# Altium footprint library WR-PHD_Socket Header_2.54mm.PcbLib: 187 footprints (part 2 of 12)
Each footprint in its own frame and in the unit in brackets; x right, y up, seen from the top. Pads: shape width x height; smd on the part's side, far side on the other; paste and mask are expansions set on the pad; w line width, h text height; cw(c..) or ccw(c..) is an arc to the next point about the centre after c.
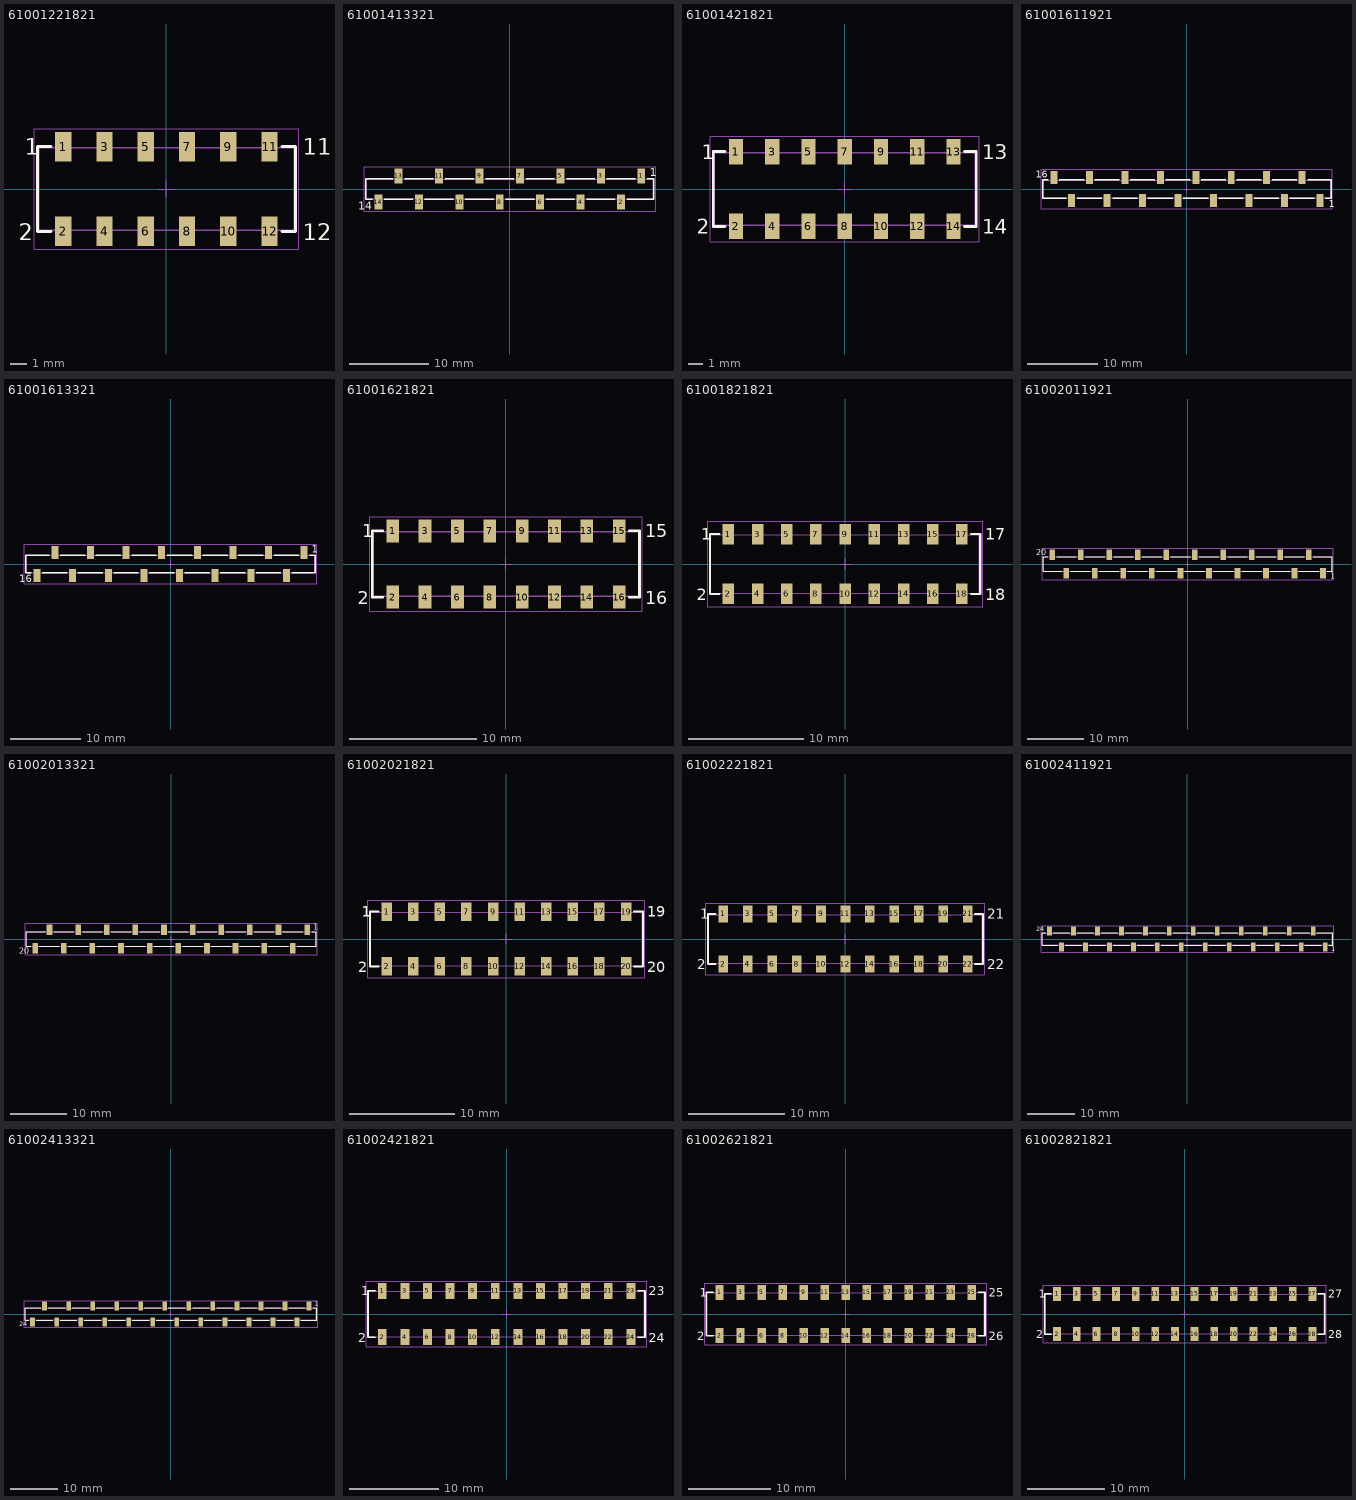
[diagram p1: the footprints below, top view; thin cyan lines are the x and y axes]

## 61001221821 [mm] "Socket Header, Pitch 2.54 mm, SMT, Vertical, dual row, 12p"
height 7.45
pads (12):
  rect 1x1.8 smd: 1(-6.35,2.6) 2(-6.35,-2.6) 3(-3.81,2.6) 4(-3.81,-2.6) 5(-1.27,2.6) 6(-1.27,-2.6) 7(1.27,2.6) 8(1.27,-2.6) 9(3.81,2.6) 10(3.81,-2.6) 11(6.35,2.6) 12(6.35,-2.6)
Top Overlay:
  lines w0.2: -7.13,-2.615 -7.945,-2.615 -7.945,2.615 -7.13,2.615 ; 7.13,-2.615 7.945,-2.615 7.945,2.615 7.13,2.615
  text "1" at -8.73,2.1 h1.02
  text "2" at -9.08,-3.15 h1.02
  text "11" at 8.38,2.1 h1.02
  text "12" at 8.38,-3.15 h1.02
Mechanical 13:
  lines w0.1: -6.67,-2.54 -6.67,-3.35 -6.03,-3.35 -6.03,-2.54 ; -6.67,2.54 -6.67,3.35 -6.03,3.35 -6.03,2.54 ; -4.13,-2.54 -4.13,-3.35 -3.49,-3.35 -3.49,-2.54 ; -4.13,2.54 -4.13,3.35 -3.49,3.35 -3.49,2.54 ; -1.59,-2.54 -1.59,-3.35 -0.95,-3.35 -0.95,-2.54 ; -1.59,2.54 -1.59,3.35 -0.95,3.35 -0.95,2.54 ; 0.95,-2.54 0.95,-3.35 1.59,-3.35 1.59,-2.54 ; 0.95,2.54 0.95,3.35 1.59,3.35 1.59,2.54 ; 3.49,-2.54 3.49,-3.35 4.13,-3.35 4.13,-2.54 ; 3.49,2.54 3.49,3.35 4.13,3.35 4.13,2.54 ; 6.03,-2.54 6.03,-3.35 6.67,-3.35 6.67,-2.54 ; 6.03,2.54 6.03,3.35 6.67,3.35 6.67,2.54 ; -7.87,-2.54 7.87,-2.54 7.87,2.54 -7.87,2.54 -7.87,-2.54
Mechanical 15:
  lines w0.05: -0.5,0 0.5,0 ; 0,-0.5 0,0.5 ; -8.145,-3.7 8.145,-3.7 8.145,3.7 -8.145,3.7 -8.145,-3.7
3D body "61001221821.stp": height 8.5, standoff 0, extent -7.62,-3.35 7.62,3.35

## 61001413321 [mm] "Socket Header, Pitch 2.54 mm, SMT, Vertical, single row, 14p"
height 7.5
pads (14):
  rect 1x1.91 smd: 1(16.51,1.645) 2(13.97,-1.645) 3(11.43,1.645) 4(8.89,-1.645) 5(6.35,1.645) 6(3.81,-1.645) 7(1.27,1.645) 8(-1.27,-1.645) 9(-3.81,1.645) 10(-6.35,-1.645) 11(-8.89,1.645) 12(-11.43,-1.645) 13(-13.97,1.645) 14(-16.51,-1.645)
Top Overlay:
  lines w0.2: -17.3,-1.275 -18.105,-1.275 -18.105,1.275 -14.75,1.275 ; -15.75,-1.275 -12.21,-1.275 ; -13.19,1.275 -9.65,1.275 ; -10.67,-1.275 -7.13,-1.275 ; -8.11,1.275 -4.57,1.275 ; -5.59,-1.275 -2.05,-1.275 ; -3.03,1.275 0.51,1.275 ; -0.51,-1.275 3.03,-1.275 ; 2.05,1.275 5.59,1.275 ; 4.57,-1.275 8.11,-1.275 ; 7.13,1.275 10.67,1.275 ; 9.65,-1.275 13.19,-1.275 ; 12.21,1.275 15.75,1.275 ; 14.75,-1.275 18.105,-1.275 18.105,1.275 17.3,1.275
  text "14" at -19.08,-2.6 h1.02
  text "1" at 17.6,1.6 h1.02
Mechanical 13:
  lines w0.1: -16.76,-1.25 -16.76,-2.025 -16.26,-2.025 -16.26,-1.25 ; -14.22,1.25 -14.22,2.025 -13.72,2.025 -13.72,1.25 ; -11.68,-1.25 -11.68,-2.025 -11.18,-2.025 -11.18,-1.25 ; -9.14,1.25 -9.14,2.025 -8.64,2.025 -8.64,1.25 ; -6.6,-1.25 -6.6,-2.025 -6.1,-2.025 -6.1,-1.25 ; -4.06,1.25 -4.06,2.025 -3.56,2.025 -3.56,1.25 ; -1.52,-1.25 -1.52,-2.025 -1.02,-2.025 -1.02,-1.25 ; 1.02,1.25 1.02,2.025 1.52,2.025 1.52,1.25 ; 3.56,-1.25 3.56,-2.025 4.06,-2.025 4.06,-1.25 ; 6.1,1.25 6.1,2.025 6.6,2.025 6.6,1.25 ; 8.64,-1.25 8.64,-2.025 9.14,-2.025 9.14,-1.25 ; 11.18,1.25 11.18,2.025 11.68,2.025 11.68,1.25 ; 13.72,-1.25 13.72,-2.025 14.22,-2.025 14.22,-1.25 ; 16.26,1.25 16.26,2.025 16.76,2.025 16.76,1.25 ; -18.03,-1.25 18.03,-1.25 18.03,1.25 -18.03,1.25 -18.03,-1.25
Mechanical 15:
  lines w0.05: -0.5,0 0.5,0 ; 0,-0.5 0,0.5 ; -18.305,-2.8 -18.305,2.8 18.305,2.8 18.305,-2.8 -18.305,-2.8
3D body "61001413321.stp": height 7.5, standoff 0, extent -18.03,-2.025 18.03,2.025

## 61001421821 [mm] "Socket Header, Pitch 2.54 mm, SMT, Vertical, dual row, 14p"
height 7.45
pads (14):
  rect 1x1.8 smd: 1(-7.62,2.6) 2(-7.62,-2.6) 3(-5.08,2.6) 4(-5.08,-2.6) 5(-2.54,2.6) 6(-2.54,-2.6) 7(0,2.6) 8(0,-2.6) 9(2.54,2.6) 10(2.54,-2.6) 11(5.08,2.6) 12(5.08,-2.6) 13(7.62,2.6) 14(7.62,-2.6)
Top Overlay:
  lines w0.2: -8.4,-2.615 -9.215,-2.615 -9.215,2.615 -8.4,2.615 ; 8.4,-2.615 9.215,-2.615 9.215,2.615 8.4,2.615
  text "1" at -10,2.1 h1.02
  text "2" at -10.35,-3.15 h1.02
  text "13" at 9.65,2.1 h1.02
  text "14" at 9.65,-3.15 h1.02
Mechanical 13:
  lines w0.1: -7.94,-2.54 -7.94,-3.35 -7.3,-3.35 -7.3,-2.54 ; -7.94,2.54 -7.94,3.35 -7.3,3.35 -7.3,2.54 ; -5.4,-2.54 -5.4,-3.35 -4.76,-3.35 -4.76,-2.54 ; -5.4,2.54 -5.4,3.35 -4.76,3.35 -4.76,2.54 ; -2.86,-2.54 -2.86,-3.35 -2.22,-3.35 -2.22,-2.54 ; -2.86,2.54 -2.86,3.35 -2.22,3.35 -2.22,2.54 ; -0.32,-2.54 -0.32,-3.35 0.32,-3.35 0.32,-2.54 ; -0.32,2.54 -0.32,3.35 0.32,3.35 0.32,2.54 ; 2.22,-2.54 2.22,-3.35 2.86,-3.35 2.86,-2.54 ; 2.22,2.54 2.22,3.35 2.86,3.35 2.86,2.54 ; 4.76,-2.54 4.76,-3.35 5.4,-3.35 5.4,-2.54 ; 4.76,2.54 4.76,3.35 5.4,3.35 5.4,2.54 ; 7.3,-2.54 7.3,-3.35 7.94,-3.35 7.94,-2.54 ; 7.3,2.54 7.3,3.35 7.94,3.35 7.94,2.54 ; -9.14,-2.54 -9.14,2.54 9.14,2.54 9.14,-2.54 -9.14,-2.54
Mechanical 15:
  lines w0.05: -0.5,0 0.5,0 ; 0,-0.5 0,0.5 ; -9.415,-3.7 -9.415,3.7 9.415,3.7 9.415,-3.7 -9.415,-3.7
3D body "61001421821.stp": height 8.5, standoff 0, extent -8.89,-3.35 8.89,3.35

## 61001611921 [mm] "Socket Header, Pitch 2.54 mm, SMT, Vertical, single row, 16p"
height 7.5
pads (16):
  rect 1x1.91 smd: 1(19.05,-1.645) 2(16.51,1.645) 3(13.97,-1.645) 4(11.43,1.645) 5(8.89,-1.645) 6(6.35,1.645) 7(3.81,-1.645) 8(1.27,1.645) 9(-1.27,-1.645) 10(-3.81,1.645) 11(-6.35,-1.645) 12(-8.89,1.645) 13(-11.43,-1.645) 14(-13.97,1.645) 15(-16.51,-1.645) 16(-19.05,1.645)
Top Overlay:
  lines w0.2: -19.84,1.325 -20.645,1.325 -20.645,-1.325 -17.28,-1.325 ; -18.26,1.325 -14.74,1.325 ; -15.74,-1.325 -12.22,-1.325 ; -13.18,1.325 -9.66,1.325 ; -10.66,-1.325 -7.14,-1.325 ; -8.1,1.325 -4.58,1.325 ; -5.58,-1.325 -2.06,-1.325 ; -3.02,1.325 0.5,1.325 ; -0.5,-1.325 3.02,-1.325 ; 2.06,1.325 5.58,1.325 ; 4.58,-1.325 8.1,-1.325 ; 7.14,1.325 10.66,1.325 ; 9.66,-1.325 13.18,-1.325 ; 12.22,1.325 15.74,1.325 ; 14.74,-1.325 18.26,-1.325 ; 17.28,1.325 20.645,1.325 20.645,-1.325 19.84,-1.325
  text "1" at 20.34,-2.6 h1.02
  text "16" at -21.62,1.6 h1.02
Mechanical 13:
  lines w0.1: -19.3,1.25 -19.3,2.025 -18.8,2.025 -18.8,1.25 ; -16.76,-1.25 -16.76,-2.025 -16.26,-2.025 -16.26,-1.25 ; -14.22,1.25 -14.22,2.025 -13.72,2.025 -13.72,1.25 ; -11.68,-1.25 -11.68,-2.025 -11.18,-2.025 -11.18,-1.25 ; -9.14,1.25 -9.14,2.025 -8.64,2.025 -8.64,1.25 ; -6.6,-1.25 -6.6,-2.025 -6.1,-2.025 -6.1,-1.25 ; -4.06,1.25 -4.06,2.025 -3.56,2.025 -3.56,1.25 ; -1.52,-1.25 -1.52,-2.025 -1.02,-2.025 -1.02,-1.25 ; 1.02,1.25 1.02,2.025 1.52,2.025 1.52,1.25 ; 3.56,-1.25 3.56,-2.025 4.06,-2.025 4.06,-1.25 ; 6.1,1.25 6.1,2.025 6.6,2.025 6.6,1.25 ; 8.64,-1.25 8.64,-2.025 9.14,-2.025 9.14,-1.25 ; 11.18,1.25 11.18,2.025 11.68,2.025 11.68,1.25 ; 13.72,-1.25 13.72,-2.025 14.22,-2.025 14.22,-1.25 ; 16.26,1.25 16.26,2.025 16.76,2.025 16.76,1.25 ; 18.8,-1.25 18.8,-2.025 19.3,-2.025 19.3,-1.25 ; -20.57,-1.25 -20.57,1.25 20.57,1.25 20.57,-1.25 -20.57,-1.25
Mechanical 15:
  lines w0.05: -0.5,0 0.5,0 ; 0,-0.5 0,0.5 ; -20.845,-2.8 20.845,-2.8 20.845,2.8 -20.845,2.8 -20.845,-2.8
3D body "61001611921.stp": height 7.5, standoff 0, extent -20.57,-2.025 20.57,2.025

## 61001613321 [mm] "Socket Header, Pitch 2.54 mm, SMT, Vertical, single row, 16p"
height 7.5
pads (16):
  rect 1x1.91 smd: 1(19.05,1.645) 2(16.51,-1.645) 3(13.97,1.645) 4(11.43,-1.645) 5(8.89,1.645) 6(6.35,-1.645) 7(3.81,1.645) 8(1.27,-1.645) 9(-1.27,1.645) 10(-3.81,-1.645) 11(-6.35,1.645) 12(-8.89,-1.645) 13(-11.43,1.645) 14(-13.97,-1.645) 15(-16.51,1.645) 16(-19.05,-1.645)
Top Overlay:
  lines w0.2: -19.84,-1.275 -20.645,-1.275 -20.645,1.275 -17.29,1.275 ; -18.29,-1.275 -14.75,-1.275 ; -15.73,1.275 -12.19,1.275 ; -13.21,-1.275 -9.67,-1.275 ; -10.65,1.275 -7.11,1.275 ; -8.13,-1.275 -4.59,-1.275 ; -5.57,1.275 -2.03,1.275 ; -3.05,-1.275 0.49,-1.275 ; -0.49,1.275 3.05,1.275 ; 2.03,-1.275 5.57,-1.275 ; 4.59,1.275 8.13,1.275 ; 7.11,-1.275 10.65,-1.275 ; 9.67,1.275 13.21,1.275 ; 12.19,-1.275 15.73,-1.275 ; 14.75,1.275 18.29,1.275 ; 17.29,-1.275 20.645,-1.275 20.645,1.275 19.84,1.275
  text "1" at 20.14,1.6 h1.02
  text "16" at -21.62,-2.6 h1.02
Mechanical 13:
  lines w0.1: -19.3,-1.25 -19.3,-2.025 -18.8,-2.025 -18.8,-1.25 ; -16.76,1.25 -16.76,2.025 -16.26,2.025 -16.26,1.25 ; -14.22,-1.25 -14.22,-2.025 -13.72,-2.025 -13.72,-1.25 ; -11.68,1.25 -11.68,2.025 -11.18,2.025 -11.18,1.25 ; -9.14,-1.25 -9.14,-2.025 -8.64,-2.025 -8.64,-1.25 ; -6.6,1.25 -6.6,2.025 -6.1,2.025 -6.1,1.25 ; -4.06,-1.25 -4.06,-2.025 -3.56,-2.025 -3.56,-1.25 ; -1.52,1.25 -1.52,2.025 -1.02,2.025 -1.02,1.25 ; 1.02,-1.25 1.02,-2.025 1.52,-2.025 1.52,-1.25 ; 3.56,1.25 3.56,2.025 4.06,2.025 4.06,1.25 ; 6.1,-1.25 6.1,-2.025 6.6,-2.025 6.6,-1.25 ; 8.64,1.25 8.64,2.025 9.14,2.025 9.14,1.25 ; 11.18,-1.25 11.18,-2.025 11.68,-2.025 11.68,-1.25 ; 13.72,1.25 13.72,2.025 14.22,2.025 14.22,1.25 ; 16.26,-1.25 16.26,-2.025 16.76,-2.025 16.76,-1.25 ; 18.8,1.25 18.8,2.025 19.3,2.025 19.3,1.25 ; -20.57,-1.25 20.57,-1.25 20.57,1.25 -20.57,1.25 -20.57,-1.25
Mechanical 15:
  lines w0.05: -0.5,0 0.5,0 ; 0,-0.5 0,0.5 ; -20.845,-2.8 -20.845,2.8 20.845,2.8 20.845,-2.8 -20.845,-2.8
3D body "61001613321.stp": height 7.5, standoff 0, extent -20.57,-2.025 20.57,2.025

## 61001621821 [mm] "Socket Header, Pitch 2.54 mm, SMT, Vertical, dual row, 16p"
height 7.45
pads (16):
  rect 1x1.8 smd: 1(-8.89,2.6) 2(-8.89,-2.6) 3(-6.35,2.6) 4(-6.35,-2.6) 5(-3.81,2.6) 6(-3.81,-2.6) 7(-1.27,2.6) 8(-1.27,-2.6) 9(1.27,2.6) 10(1.27,-2.6) 11(3.81,2.6) 12(3.81,-2.6) 13(6.35,2.6) 14(6.35,-2.6) 15(8.89,2.6) 16(8.89,-2.6)
Top Overlay:
  lines w0.2: -9.67,-2.615 -10.485,-2.615 -10.485,2.615 -9.67,2.615 ; 9.67,-2.615 10.485,-2.615 10.485,2.615 9.67,2.615
  text "1" at -11.27,2.1 h1.02
  text "2" at -11.62,-3.15 h1.02
  text "15" at 10.92,2.1 h1.02
  text "16" at 10.92,-3.15 h1.02
Mechanical 13:
  lines w0.1: -9.21,-2.54 -9.21,-3.35 -8.57,-3.35 -8.57,-2.54 ; -9.21,2.54 -9.21,3.35 -8.57,3.35 -8.57,2.54 ; -6.67,-2.54 -6.67,-3.35 -6.03,-3.35 -6.03,-2.54 ; -6.67,2.54 -6.67,3.35 -6.03,3.35 -6.03,2.54 ; -4.13,-2.54 -4.13,-3.35 -3.49,-3.35 -3.49,-2.54 ; -4.13,2.54 -4.13,3.35 -3.49,3.35 -3.49,2.54 ; -1.59,-2.54 -1.59,-3.35 -0.95,-3.35 -0.95,-2.54 ; -1.59,2.54 -1.59,3.35 -0.95,3.35 -0.95,2.54 ; 0.95,-2.54 0.95,-3.35 1.59,-3.35 1.59,-2.54 ; 0.95,2.54 0.95,3.35 1.59,3.35 1.59,2.54 ; 3.49,-2.54 3.49,-3.35 4.13,-3.35 4.13,-2.54 ; 3.49,2.54 3.49,3.35 4.13,3.35 4.13,2.54 ; 6.03,-2.54 6.03,-3.35 6.67,-3.35 6.67,-2.54 ; 6.03,2.54 6.03,3.35 6.67,3.35 6.67,2.54 ; 8.57,-2.54 8.57,-3.35 9.21,-3.35 9.21,-2.54 ; 8.57,2.54 8.57,3.35 9.21,3.35 9.21,2.54 ; -10.41,-2.54 -10.41,2.54 10.41,2.54 10.41,-2.54 -10.41,-2.54
Mechanical 15:
  lines w0.05: -0.5,0 0.5,0 ; 0,-0.5 0,0.5 ; -10.685,-3.7 -10.685,3.7 10.685,3.7 10.685,-3.7 -10.685,-3.7
3D body "61001621821.stp": height 8.5, standoff 0, extent -10.16,-3.35 10.16,3.35

## 61001821821 [mm] "Socket Header, Pitch 2.54 mm, SMT, Vertical, dual row, 18p"
height 7.45
pads (18):
  rect 1x1.8 smd: 1(-10.16,2.6) 2(-10.16,-2.6) 3(-7.62,2.6) 4(-7.62,-2.6) 5(-5.08,2.6) 6(-5.08,-2.6) 7(-2.54,2.6) 8(-2.54,-2.6) 9(0,2.6) 10(0,-2.6) 11(2.54,2.6) 12(2.54,-2.6) 13(5.08,2.6) 14(5.08,-2.6) 15(7.62,2.6) 16(7.62,-2.6) 17(10.16,2.6) 18(10.16,-2.6)
Top Overlay:
  lines w0.2: -10.94,-2.615 -11.755,-2.615 -11.755,2.615 -10.94,2.615 ; 10.94,-2.615 11.755,-2.615 11.755,2.615 10.94,2.615
  text "1" at -12.54,2.1 h1.02
  text "2" at -12.89,-3.15 h1.02
  text "17" at 12.19,2.1 h1.02
  text "18" at 12.19,-3.15 h1.02
Mechanical 13:
  lines w0.1: -10.48,-2.54 -10.48,-3.35 -9.84,-3.35 -9.84,-2.54 ; -10.48,2.54 -10.48,3.35 -9.84,3.35 -9.84,2.54 ; -7.94,-2.54 -7.94,-3.35 -7.3,-3.35 -7.3,-2.54 ; -7.94,2.54 -7.94,3.35 -7.3,3.35 -7.3,2.54 ; -5.4,-2.54 -5.4,-3.35 -4.76,-3.35 -4.76,-2.54 ; -5.4,2.54 -5.4,3.35 -4.76,3.35 -4.76,2.54 ; -2.86,-2.54 -2.86,-3.35 -2.22,-3.35 -2.22,-2.54 ; -2.86,2.54 -2.86,3.35 -2.22,3.35 -2.22,2.54 ; -0.32,-2.54 -0.32,-3.35 0.32,-3.35 0.32,-2.54 ; -0.32,2.54 -0.32,3.35 0.32,3.35 0.32,2.54 ; 2.22,-2.54 2.22,-3.35 2.86,-3.35 2.86,-2.54 ; 2.22,2.54 2.22,3.35 2.86,3.35 2.86,2.54 ; 4.76,-2.54 4.76,-3.35 5.4,-3.35 5.4,-2.54 ; 4.76,2.54 4.76,3.35 5.4,3.35 5.4,2.54 ; 7.3,-2.54 7.3,-3.35 7.94,-3.35 7.94,-2.54 ; 7.3,2.54 7.3,3.35 7.94,3.35 7.94,2.54 ; 9.84,-2.54 9.84,-3.35 10.48,-3.35 10.48,-2.54 ; 9.84,2.54 9.84,3.35 10.48,3.35 10.48,2.54 ; -11.68,-2.54 11.68,-2.54 11.68,2.54 -11.68,2.54 -11.68,-2.54
Mechanical 15:
  lines w0.05: -0.5,0 0.5,0 ; 0,-0.5 0,0.5 ; -11.955,-3.7 11.955,-3.7 11.955,3.7 -11.955,3.7 -11.955,-3.7
3D body "61001821821.stp": height 8.5, standoff 0, extent -11.43,-3.35 11.43,3.35

## 61002011921 [mm] "Socket Header, Pitch 2.54 mm, SMT, Vertical, single row, 20p"
height 7.5
pads (20):
  rect 1x1.91 smd: 1(24.13,-1.645) 2(21.59,1.645) 3(19.05,-1.645) 4(16.51,1.645) 5(13.97,-1.645) 6(11.43,1.645) 7(8.89,-1.645) 8(6.35,1.645) 9(3.81,-1.645) 10(1.27,1.645) 11(-1.27,-1.645) 12(-3.81,1.645) 13(-6.35,-1.645) 14(-8.89,1.645) 15(-11.43,-1.645) 16(-13.97,1.645) 17(-16.51,-1.645) 18(-19.05,1.645) 19(-21.59,-1.645) 20(-24.13,1.645)
Top Overlay:
  lines w0.2: -24.92,1.325 -25.725,1.325 -25.725,-1.325 -22.36,-1.325 ; -23.34,1.325 -19.82,1.325 ; -20.82,-1.325 -17.3,-1.325 ; -18.26,1.325 -14.74,1.325 ; -15.74,-1.325 -12.22,-1.325 ; -13.18,1.325 -9.66,1.325 ; -10.66,-1.325 -7.14,-1.325 ; -8.1,1.325 -4.58,1.325 ; -5.58,-1.325 -2.06,-1.325 ; -3.02,1.325 0.5,1.325 ; -0.5,-1.325 3.02,-1.325 ; 2.06,1.325 5.58,1.325 ; 4.58,-1.325 8.1,-1.325 ; 7.14,1.325 10.66,1.325 ; 9.66,-1.325 13.18,-1.325 ; 12.22,1.325 15.74,1.325 ; 14.74,-1.325 18.26,-1.325 ; 17.3,1.325 20.82,1.325 ; 19.82,-1.325 23.34,-1.325 ; 22.36,1.325 25.725,1.325 25.725,-1.325 24.92,-1.325
  text "1" at 25.42,-2.6 h1.02
  text "20" at -27,1.6 h1.02
Mechanical 13:
  lines w0.1: -24.38,1.25 -24.38,2.025 -23.88,2.025 -23.88,1.25 ; -21.84,-1.25 -21.84,-2.025 -21.34,-2.025 -21.34,-1.25 ; -19.3,1.25 -19.3,2.025 -18.8,2.025 -18.8,1.25 ; -16.76,-1.25 -16.76,-2.025 -16.26,-2.025 -16.26,-1.25 ; -14.22,1.25 -14.22,2.025 -13.72,2.025 -13.72,1.25 ; -11.68,-1.25 -11.68,-2.025 -11.18,-2.025 -11.18,-1.25 ; -9.14,1.25 -9.14,2.025 -8.64,2.025 -8.64,1.25 ; -6.6,-1.25 -6.6,-2.025 -6.1,-2.025 -6.1,-1.25 ; -4.06,1.25 -4.06,2.025 -3.56,2.025 -3.56,1.25 ; -1.52,-1.25 -1.52,-2.025 -1.02,-2.025 -1.02,-1.25 ; 1.02,1.25 1.02,2.025 1.52,2.025 1.52,1.25 ; 3.56,-1.25 3.56,-2.025 4.06,-2.025 4.06,-1.25 ; 6.1,1.25 6.1,2.025 6.6,2.025 6.6,1.25 ; 8.64,-1.25 8.64,-2.025 9.14,-2.025 9.14,-1.25 ; 11.18,1.25 11.18,2.025 11.68,2.025 11.68,1.25 ; 13.72,-1.25 13.72,-2.025 14.22,-2.025 14.22,-1.25 ; 16.26,1.25 16.26,2.025 16.76,2.025 16.76,1.25 ; 18.8,-1.25 18.8,-2.025 19.3,-2.025 19.3,-1.25 ; 21.34,1.25 21.34,2.025 21.84,2.025 21.84,1.25 ; 23.88,-1.25 23.88,-2.025 24.38,-2.025 24.38,-1.25 ; -25.65,-1.25 -25.65,1.25 25.65,1.25 25.65,-1.25 -25.65,-1.25
Mechanical 15:
  lines w0.05: -0.5,0 0.5,0 ; 0,-0.5 0,0.5 ; -25.925,-2.8 25.925,-2.8 25.925,2.8 -25.925,2.8 -25.925,-2.8
3D body "61002011921.stp": height 7.5, standoff 0, extent -25.65,-2.025 25.65,2.025

## 61002013321 [mm] "Socket Header, Pitch 2.54 mm, SMT, Vertical, single row, 20p"
height 7.5
pads (20):
  rect 1x1.91 smd: 1(24.13,1.645) 2(21.59,-1.645) 3(19.05,1.645) 4(16.51,-1.645) 5(13.97,1.645) 6(11.43,-1.645) 7(8.89,1.645) 8(6.35,-1.645) 9(3.81,1.645) 10(1.27,-1.645) 11(-1.27,1.645) 12(-3.81,-1.645) 13(-6.35,1.645) 14(-8.89,-1.645) 15(-11.43,1.645) 16(-13.97,-1.645) 17(-16.51,1.645) 18(-19.05,-1.645) 19(-21.59,1.645) 20(-24.13,-1.645)
Top Overlay:
  lines w0.2: -24.92,-1.275 -25.725,-1.275 -25.725,1.275 -22.37,1.275 ; -23.37,-1.275 -19.83,-1.275 ; -20.81,1.275 -17.27,1.275 ; -18.29,-1.275 -14.75,-1.275 ; -15.73,1.275 -12.19,1.275 ; -13.21,-1.275 -9.67,-1.275 ; -10.65,1.275 -7.11,1.275 ; -8.13,-1.275 -4.59,-1.275 ; -5.57,1.275 -2.03,1.275 ; -3.05,-1.275 0.49,-1.275 ; -0.49,1.275 3.05,1.275 ; 2.03,-1.275 5.57,-1.275 ; 4.59,1.275 8.13,1.275 ; 7.11,-1.275 10.65,-1.275 ; 9.67,1.275 13.21,1.275 ; 12.19,-1.275 15.73,-1.275 ; 14.75,1.275 18.29,1.275 ; 17.27,-1.275 20.81,-1.275 ; 19.83,1.275 23.37,1.275 ; 22.37,-1.275 25.725,-1.275 25.725,1.275 24.92,1.275
  text "1" at 25.22,1.6 h1.02
  text "20" at -27,-2.6 h1.02
Mechanical 13:
  lines w0.1: -24.38,-1.25 -24.38,-2.025 -23.88,-2.025 -23.88,-1.25 ; -21.84,1.25 -21.84,2.025 -21.34,2.025 -21.34,1.25 ; -19.3,-1.25 -19.3,-2.025 -18.8,-2.025 -18.8,-1.25 ; -16.76,1.25 -16.76,2.025 -16.26,2.025 -16.26,1.25 ; -14.22,-1.25 -14.22,-2.025 -13.72,-2.025 -13.72,-1.25 ; -11.68,1.25 -11.68,2.025 -11.18,2.025 -11.18,1.25 ; -9.14,-1.25 -9.14,-2.025 -8.64,-2.025 -8.64,-1.25 ; -6.6,1.25 -6.6,2.025 -6.1,2.025 -6.1,1.25 ; -4.06,-1.25 -4.06,-2.025 -3.56,-2.025 -3.56,-1.25 ; -1.52,1.25 -1.52,2.025 -1.02,2.025 -1.02,1.25 ; 1.02,-1.25 1.02,-2.025 1.52,-2.025 1.52,-1.25 ; 3.56,1.25 3.56,2.025 4.06,2.025 4.06,1.25 ; 6.1,-1.25 6.1,-2.025 6.6,-2.025 6.6,-1.25 ; 8.64,1.25 8.64,2.025 9.14,2.025 9.14,1.25 ; 11.18,-1.25 11.18,-2.025 11.68,-2.025 11.68,-1.25 ; 13.72,1.25 13.72,2.025 14.22,2.025 14.22,1.25 ; 16.26,-1.25 16.26,-2.025 16.76,-2.025 16.76,-1.25 ; 18.8,1.25 18.8,2.025 19.3,2.025 19.3,1.25 ; 21.34,-1.25 21.34,-2.025 21.84,-2.025 21.84,-1.25 ; 23.88,1.25 23.88,2.025 24.38,2.025 24.38,1.25 ; -25.65,-1.25 25.65,-1.25 25.65,1.25 -25.65,1.25 -25.65,-1.25
Mechanical 15:
  lines w0.05: -0.5,0 0.5,0 ; 0,-0.5 0,0.5 ; -25.925,-2.8 -25.925,2.8 25.925,2.8 25.925,-2.8 -25.925,-2.8
3D body "61002013321.stp": height 7.5, standoff 0, extent -25.65,-2.025 25.65,2.025

## 61002021821 [mm] "Socket Header, Pitch 2.54 mm, SMT, Vertical, dual row, 20p"
height 7.45
pads (20):
  rect 1x1.8 smd: 1(-11.43,2.6) 2(-11.43,-2.6) 3(-8.89,2.6) 4(-8.89,-2.6) 5(-6.35,2.6) 6(-6.35,-2.6) 7(-3.81,2.6) 8(-3.81,-2.6) 9(-1.27,2.6) 10(-1.27,-2.6) 11(1.27,2.6) 12(1.27,-2.6) 13(3.81,2.6) 14(3.81,-2.6) 15(6.35,2.6) 16(6.35,-2.6) 17(8.89,2.6) 18(8.89,-2.6) 19(11.43,2.6) 20(11.43,-2.6)
Top Overlay:
  lines w0.2: -12.21,-2.615 -13.025,-2.615 -13.025,2.615 -12.21,2.615 ; 12.21,-2.615 13.025,-2.615 13.025,2.615 12.21,2.615
  text "1" at -13.81,2.1 h1.02
  text "2" at -14.16,-3.15 h1.02
  text "19" at 13.46,2.1 h1.02
  text "20" at 13.46,-3.15 h1.02
Mechanical 13:
  lines w0.1: -11.75,-2.54 -11.75,-3.35 -11.11,-3.35 -11.11,-2.54 ; -11.75,2.54 -11.75,3.35 -11.11,3.35 -11.11,2.54 ; -9.21,-2.54 -9.21,-3.35 -8.57,-3.35 -8.57,-2.54 ; -9.21,2.54 -9.21,3.35 -8.57,3.35 -8.57,2.54 ; -6.67,-2.54 -6.67,-3.35 -6.03,-3.35 -6.03,-2.54 ; -6.67,2.54 -6.67,3.35 -6.03,3.35 -6.03,2.54 ; -4.13,-2.54 -4.13,-3.35 -3.49,-3.35 -3.49,-2.54 ; -4.13,2.54 -4.13,3.35 -3.49,3.35 -3.49,2.54 ; -1.59,-2.54 -1.59,-3.35 -0.95,-3.35 -0.95,-2.54 ; -1.59,2.54 -1.59,3.35 -0.95,3.35 -0.95,2.54 ; 0.95,-2.54 0.95,-3.35 1.59,-3.35 1.59,-2.54 ; 0.95,2.54 0.95,3.35 1.59,3.35 1.59,2.54 ; 3.49,-2.54 3.49,-3.35 4.13,-3.35 4.13,-2.54 ; 3.49,2.54 3.49,3.35 4.13,3.35 4.13,2.54 ; 6.03,-2.54 6.03,-3.35 6.67,-3.35 6.67,-2.54 ; 6.03,2.54 6.03,3.35 6.67,3.35 6.67,2.54 ; 8.57,-2.54 8.57,-3.35 9.21,-3.35 9.21,-2.54 ; 8.57,2.54 8.57,3.35 9.21,3.35 9.21,2.54 ; 11.11,-2.54 11.11,-3.35 11.75,-3.35 11.75,-2.54 ; 11.11,2.54 11.11,3.35 11.75,3.35 11.75,2.54 ; -12.95,-2.54 -12.95,2.54 12.95,2.54 12.95,-2.54 -12.95,-2.54
Mechanical 15:
  lines w0.05: -0.5,0 0.5,0 ; 0,-0.5 0,0.5 ; -13.225,-3.7 -13.225,3.7 13.225,3.7 13.225,-3.7 -13.225,-3.7
3D body "61002021821.stp": height 8.5, standoff 0, extent -12.7,-3.35 12.7,3.35

## 61002221821 [mm] "Socket Header, Pitch 2.54 mm, SMT, Vertical, dual row, 22p"
height 7.45
pads (22):
  rect 1x1.8 smd: 1(-12.7,2.6) 2(-12.7,-2.6) 3(-10.16,2.6) 4(-10.16,-2.6) 5(-7.62,2.6) 6(-7.62,-2.6) 7(-5.08,2.6) 8(-5.08,-2.6) 9(-2.54,2.6) 10(-2.54,-2.6) 11(0,2.6) 12(0,-2.6) 13(2.54,2.6) 14(2.54,-2.6) 15(5.08,2.6) 16(5.08,-2.6) 17(7.62,2.6) 18(7.62,-2.6) 19(10.16,2.6) 20(10.16,-2.6) 21(12.7,2.6) 22(12.7,-2.6)
Top Overlay:
  lines w0.2: -13.48,-2.615 -14.295,-2.615 -14.295,2.615 -13.48,2.615 ; 13.48,-2.615 14.295,-2.615 14.295,2.615 13.48,2.615
  text "1" at -15.08,2.1 h1.02
  text "2" at -15.43,-3.15 h1.02
  text "21" at 14.73,2.1 h1.02
  text "22" at 14.73,-3.15 h1.02
Mechanical 13:
  lines w0.1: -13.02,-2.54 -13.02,-3.35 -12.38,-3.35 -12.38,-2.54 ; -13.02,2.54 -13.02,3.35 -12.38,3.35 -12.38,2.54 ; -10.48,-2.54 -10.48,-3.35 -9.84,-3.35 -9.84,-2.54 ; -10.48,2.54 -10.48,3.35 -9.84,3.35 -9.84,2.54 ; -7.94,-2.54 -7.94,-3.35 -7.3,-3.35 -7.3,-2.54 ; -7.94,2.54 -7.94,3.35 -7.3,3.35 -7.3,2.54 ; -5.4,-2.54 -5.4,-3.35 -4.76,-3.35 -4.76,-2.54 ; -5.4,2.54 -5.4,3.35 -4.76,3.35 -4.76,2.54 ; -2.86,-2.54 -2.86,-3.35 -2.22,-3.35 -2.22,-2.54 ; -2.86,2.54 -2.86,3.35 -2.22,3.35 -2.22,2.54 ; -0.32,-2.54 -0.32,-3.35 0.32,-3.35 0.32,-2.54 ; -0.32,2.54 -0.32,3.35 0.32,3.35 0.32,2.54 ; 2.22,-2.54 2.22,-3.35 2.86,-3.35 2.86,-2.54 ; 2.22,2.54 2.22,3.35 2.86,3.35 2.86,2.54 ; 4.76,-2.54 4.76,-3.35 5.4,-3.35 5.4,-2.54 ; 4.76,2.54 4.76,3.35 5.4,3.35 5.4,2.54 ; 7.3,-2.54 7.3,-3.35 7.94,-3.35 7.94,-2.54 ; 7.3,2.54 7.3,3.35 7.94,3.35 7.94,2.54 ; 9.84,-2.54 9.84,-3.35 10.48,-3.35 10.48,-2.54 ; 9.84,2.54 9.84,3.35 10.48,3.35 10.48,2.54 ; 12.38,-2.54 12.38,-3.35 13.02,-3.35 13.02,-2.54 ; 12.38,2.54 12.38,3.35 13.02,3.35 13.02,2.54 ; -14.22,-2.54 -14.22,2.54 14.22,2.54 14.22,-2.54 -14.22,-2.54
Mechanical 15:
  lines w0.05: -0.5,0 0.5,0 ; 0,-0.5 0,0.5 ; -14.495,-3.7 -14.495,3.7 14.495,3.7 14.495,-3.7 -14.495,-3.7
3D body "61002221821.stp": height 8.5, standoff 0, extent -13.97,-3.35 13.97,3.35

## 61002411921 [mm] "Socket Header, Pitch 2.54 mm, SMT, Vertical, single row, 24p"
height 7.5
pads (24):
  rect 1x1.91 smd: 1(29.21,-1.645) 2(26.67,1.645) 3(24.13,-1.645) 4(21.59,1.645) 5(19.05,-1.645) 6(16.51,1.645) 7(13.97,-1.645) 8(11.43,1.645) 9(8.89,-1.645) 10(6.35,1.645) 11(3.81,-1.645) 12(1.27,1.645) 13(-1.27,-1.645) 14(-3.81,1.645) 15(-6.35,-1.645) 16(-8.89,1.645) 17(-11.43,-1.645) 18(-13.97,1.645) 19(-16.51,-1.645) 20(-19.05,1.645) 21(-21.59,-1.645) 22(-24.13,1.645) 23(-26.67,-1.645) 24(-29.21,1.645)
Top Overlay:
  lines w0.2: -30,1.325 -30.805,1.325 -30.805,-1.325 -27.44,-1.325 ; -28.42,1.325 -24.9,1.325 ; -25.9,-1.325 -22.38,-1.325 ; -23.34,1.325 -19.82,1.325 ; -20.82,-1.325 -17.3,-1.325 ; -18.26,1.325 -14.74,1.325 ; -15.74,-1.325 -12.22,-1.325 ; -13.18,1.325 -9.66,1.325 ; -10.66,-1.325 -7.14,-1.325 ; -8.1,1.325 -4.58,1.325 ; -5.58,-1.325 -2.06,-1.325 ; -3.02,1.325 0.5,1.325 ; -0.5,-1.325 3.02,-1.325 ; 2.06,1.325 5.58,1.325 ; 4.58,-1.325 8.1,-1.325 ; 7.14,1.325 10.66,1.325 ; 9.66,-1.325 13.18,-1.325 ; 12.22,1.325 15.74,1.325 ; 14.74,-1.325 18.26,-1.325 ; 17.3,1.325 20.82,1.325 ; 19.82,-1.325 23.34,-1.325 ; 22.38,1.325 25.9,1.325 ; 24.9,-1.325 28.42,-1.325 ; 27.44,1.325 30.805,1.325 30.805,-1.325 30,-1.325
  text "1" at 30.5,-2.6 h1.02
  text "24" at -32.08,1.6 h1.02
Mechanical 13:
  lines w0.1: -29.46,1.25 -29.46,2.025 -28.96,2.025 -28.96,1.25 ; -26.92,-1.25 -26.92,-2.025 -26.42,-2.025 -26.42,-1.25 ; -24.38,1.25 -24.38,2.025 -23.88,2.025 -23.88,1.25 ; -21.84,-1.25 -21.84,-2.025 -21.34,-2.025 -21.34,-1.25 ; -19.3,1.25 -19.3,2.025 -18.8,2.025 -18.8,1.25 ; -16.76,-1.25 -16.76,-2.025 -16.26,-2.025 -16.26,-1.25 ; -14.22,1.25 -14.22,2.025 -13.72,2.025 -13.72,1.25 ; -11.68,-1.25 -11.68,-2.025 -11.18,-2.025 -11.18,-1.25 ; -9.14,1.25 -9.14,2.025 -8.64,2.025 -8.64,1.25 ; -6.6,-1.25 -6.6,-2.025 -6.1,-2.025 -6.1,-1.25 ; -4.06,1.25 -4.06,2.025 -3.56,2.025 -3.56,1.25 ; -1.52,-1.25 -1.52,-2.025 -1.02,-2.025 -1.02,-1.25 ; 1.02,1.25 1.02,2.025 1.52,2.025 1.52,1.25 ; 3.56,-1.25 3.56,-2.025 4.06,-2.025 4.06,-1.25 ; 6.1,1.25 6.1,2.025 6.6,2.025 6.6,1.25 ; 8.64,-1.25 8.64,-2.025 9.14,-2.025 9.14,-1.25 ; 11.18,1.25 11.18,2.025 11.68,2.025 11.68,1.25 ; 13.72,-1.25 13.72,-2.025 14.22,-2.025 14.22,-1.25 ; 16.26,1.25 16.26,2.025 16.76,2.025 16.76,1.25 ; 18.8,-1.25 18.8,-2.025 19.3,-2.025 19.3,-1.25 ; 21.34,1.25 21.34,2.025 21.84,2.025 21.84,1.25 ; 23.88,-1.25 23.88,-2.025 24.38,-2.025 24.38,-1.25 ; 26.42,1.25 26.42,2.025 26.92,2.025 26.92,1.25 ; 28.96,-1.25 28.96,-2.025 29.46,-2.025 29.46,-1.25 ; -30.73,-1.25 -30.73,1.25 30.73,1.25 30.73,-1.25 -30.73,-1.25
Mechanical 15:
  lines w0.05: -0.5,0 0.5,0 ; 0,-0.5 0,0.5 ; -31.005,-2.8 31.005,-2.8 31.005,2.8 -31.005,2.8 -31.005,-2.8
3D body "61002411921.stp": height 7.5, standoff 0, extent -30.73,-2.025 30.73,2.025

## 61002413321 [mm] "Socket Header, Pitch 2.54 mm, SMT, Vertical, single row, 24p"
height 7.5
pads (24):
  rect 1x1.91 smd: 1(29.21,1.645) 2(26.67,-1.645) 3(24.13,1.645) 4(21.59,-1.645) 5(19.05,1.645) 6(16.51,-1.645) 7(13.97,1.645) 8(11.43,-1.645) 9(8.89,1.645) 10(6.35,-1.645) 11(3.81,1.645) 12(1.27,-1.645) 13(-1.27,1.645) 14(-3.81,-1.645) 15(-6.35,1.645) 16(-8.89,-1.645) 17(-11.43,1.645) 18(-13.97,-1.645) 19(-16.51,1.645) 20(-19.05,-1.645) 21(-21.59,1.645) 22(-24.13,-1.645) 23(-26.67,1.645) 24(-29.21,-1.645)
Top Overlay:
  lines w0.2: -30,-1.275 -30.805,-1.275 -30.805,1.275 -27.45,1.275 ; -28.45,-1.275 -24.91,-1.275 ; -25.89,1.275 -22.35,1.275 ; -23.37,-1.275 -19.83,-1.275 ; -20.81,1.275 -17.27,1.275 ; -18.29,-1.275 -14.75,-1.275 ; -15.73,1.275 -12.19,1.275 ; -13.21,-1.275 -9.67,-1.275 ; -10.65,1.275 -7.11,1.275 ; -8.13,-1.275 -4.59,-1.275 ; -5.57,1.275 -2.03,1.275 ; -3.05,-1.275 0.49,-1.275 ; -0.49,1.275 3.05,1.275 ; 2.03,-1.275 5.57,-1.275 ; 4.59,1.275 8.13,1.275 ; 7.11,-1.275 10.65,-1.275 ; 9.67,1.275 13.21,1.275 ; 12.19,-1.275 15.73,-1.275 ; 14.75,1.275 18.29,1.275 ; 17.27,-1.275 20.81,-1.275 ; 19.83,1.275 23.37,1.275 ; 22.35,-1.275 25.89,-1.275 ; 24.91,1.275 28.45,1.275 ; 27.45,-1.275 30.805,-1.275 30.805,1.275 30,1.275
  text "24" at -32.08,-2.6 h1.02
  text "1" at 30.3,1.6 h1.02
Mechanical 13:
  lines w0.1: -29.46,-1.25 -29.46,-2.025 -28.96,-2.025 -28.96,-1.25 ; -26.92,1.25 -26.92,2.025 -26.42,2.025 -26.42,1.25 ; -24.38,-1.25 -24.38,-2.025 -23.88,-2.025 -23.88,-1.25 ; -21.84,1.25 -21.84,2.025 -21.34,2.025 -21.34,1.25 ; -19.3,-1.25 -19.3,-2.025 -18.8,-2.025 -18.8,-1.25 ; -16.76,1.25 -16.76,2.025 -16.26,2.025 -16.26,1.25 ; -14.22,-1.25 -14.22,-2.025 -13.72,-2.025 -13.72,-1.25 ; -11.68,1.25 -11.68,2.025 -11.18,2.025 -11.18,1.25 ; -9.14,-1.25 -9.14,-2.025 -8.64,-2.025 -8.64,-1.25 ; -6.6,1.25 -6.6,2.025 -6.1,2.025 -6.1,1.25 ; -4.06,-1.25 -4.06,-2.025 -3.56,-2.025 -3.56,-1.25 ; -1.52,1.25 -1.52,2.025 -1.02,2.025 -1.02,1.25 ; 1.02,-1.25 1.02,-2.025 1.52,-2.025 1.52,-1.25 ; 3.56,1.25 3.56,2.025 4.06,2.025 4.06,1.25 ; 6.1,-1.25 6.1,-2.025 6.6,-2.025 6.6,-1.25 ; 8.64,1.25 8.64,2.025 9.14,2.025 9.14,1.25 ; 11.18,-1.25 11.18,-2.025 11.68,-2.025 11.68,-1.25 ; 13.72,1.25 13.72,2.025 14.22,2.025 14.22,1.25 ; 16.26,-1.25 16.26,-2.025 16.76,-2.025 16.76,-1.25 ; 18.8,1.25 18.8,2.025 19.3,2.025 19.3,1.25 ; 21.34,-1.25 21.34,-2.025 21.84,-2.025 21.84,-1.25 ; 23.88,1.25 23.88,2.025 24.38,2.025 24.38,1.25 ; 26.42,-1.25 26.42,-2.025 26.92,-2.025 26.92,-1.25 ; 28.96,1.25 28.96,2.025 29.46,2.025 29.46,1.25 ; -30.73,-1.25 -30.73,1.25 30.73,1.25 30.73,-1.25 -30.73,-1.25
Mechanical 15:
  lines w0.05: -0.5,0 0.5,0 ; 0,-0.5 0,0.5 ; -31.005,-2.8 31.005,-2.8 31.005,2.8 -31.005,2.8 -31.005,-2.8
3D body "61002413321.stp": height 7.5, standoff 0, extent -30.73,-2.025 30.73,2.025

## 61002421821 [mm] "Socket Header, Pitch 2.54 mm, SMT, Vertical, dual row, 24p"
height 7.45
pads (24):
  rect 1x1.8 smd: 1(-13.97,2.6) 2(-13.97,-2.6) 3(-11.43,2.6) 4(-11.43,-2.6) 5(-8.89,2.6) 6(-8.89,-2.6) 7(-6.35,2.6) 8(-6.35,-2.6) 9(-3.81,2.6) 10(-3.81,-2.6) 11(-1.27,2.6) 12(-1.27,-2.6) 13(1.27,2.6) 14(1.27,-2.6) 15(3.81,2.6) 16(3.81,-2.6) 17(6.35,2.6) 18(6.35,-2.6) 19(8.89,2.6) 20(8.89,-2.6) 21(11.43,2.6) 22(11.43,-2.6) 23(13.97,2.6) 24(13.97,-2.6)
Top Overlay:
  lines w0.2: -14.75,-2.615 -15.565,-2.615 -15.565,2.615 -14.75,2.615 ; 14.75,-2.615 15.565,-2.615 15.565,2.615 14.75,2.615
  text "1" at -16.35,2.1 h1.02
  text "2" at -16.7,-3.15 h1.02
  text "23" at 16,2.1 h1.02
  text "24" at 16,-3.15 h1.02
Mechanical 13:
  lines w0.1: -14.29,-2.54 -14.29,-3.35 -13.65,-3.35 -13.65,-2.54 ; -14.29,2.54 -14.29,3.35 -13.65,3.35 -13.65,2.54 ; -11.75,-2.54 -11.75,-3.35 -11.11,-3.35 -11.11,-2.54 ; -11.75,2.54 -11.75,3.35 -11.11,3.35 -11.11,2.54 ; -9.21,-2.54 -9.21,-3.35 -8.57,-3.35 -8.57,-2.54 ; -9.21,2.54 -9.21,3.35 -8.57,3.35 -8.57,2.54 ; -6.67,-2.54 -6.67,-3.35 -6.03,-3.35 -6.03,-2.54 ; -6.67,2.54 -6.67,3.35 -6.03,3.35 -6.03,2.54 ; -4.13,-2.54 -4.13,-3.35 -3.49,-3.35 -3.49,-2.54 ; -4.13,2.54 -4.13,3.35 -3.49,3.35 -3.49,2.54 ; -1.59,-2.54 -1.59,-3.35 -0.95,-3.35 -0.95,-2.54 ; -1.59,2.54 -1.59,3.35 -0.95,3.35 -0.95,2.54 ; 0.95,-2.54 0.95,-3.35 1.59,-3.35 1.59,-2.54 ; 0.95,2.54 0.95,3.35 1.59,3.35 1.59,2.54 ; 3.49,-2.54 3.49,-3.35 4.13,-3.35 4.13,-2.54 ; 3.49,2.54 3.49,3.35 4.13,3.35 4.13,2.54 ; 6.03,-2.54 6.03,-3.35 6.67,-3.35 6.67,-2.54 ; 6.03,2.54 6.03,3.35 6.67,3.35 6.67,2.54 ; 8.57,-2.54 8.57,-3.35 9.21,-3.35 9.21,-2.54 ; 8.57,2.54 8.57,3.35 9.21,3.35 9.21,2.54 ; 11.11,-2.54 11.11,-3.35 11.75,-3.35 11.75,-2.54 ; 11.11,2.54 11.11,3.35 11.75,3.35 11.75,2.54 ; 13.65,-2.54 13.65,-3.35 14.29,-3.35 14.29,-2.54 ; 13.65,2.54 13.65,3.35 14.29,3.35 14.29,2.54 ; -15.49,-2.54 15.49,-2.54 15.49,2.54 -15.49,2.54 -15.49,-2.54
Mechanical 15:
  lines w0.05: -0.5,0 0.5,0 ; 0,-0.5 0,0.5 ; -15.765,-3.7 15.765,-3.7 15.765,3.7 -15.765,3.7 -15.765,-3.7
3D body "61002421821.stp": height 8.5, standoff 0, extent -15.24,-3.35 15.24,3.35

## 61002621821 [mm] "Socket Header, Pitch 2.54 mm, SMT, Vertical, dual row, 26p"
height 7.45
pads (26):
  rect 1x1.8 smd: 1(-15.24,2.6) 2(-15.24,-2.6) 3(-12.7,2.6) 4(-12.7,-2.6) 5(-10.16,2.6) 6(-10.16,-2.6) 7(-7.62,2.6) 8(-7.62,-2.6) 9(-5.08,2.6) 10(-5.08,-2.6) 11(-2.54,2.6) 12(-2.54,-2.6) 13(0,2.6) 14(0,-2.6) 15(2.54,2.6) 16(2.54,-2.6) 17(5.08,2.6) 18(5.08,-2.6) 19(7.62,2.6) 20(7.62,-2.6) 21(10.16,2.6) 22(10.16,-2.6) 23(12.7,2.6) 24(12.7,-2.6) 25(15.24,2.6) 26(15.24,-2.6)
Top Overlay:
  lines w0.2: -16.02,-2.615 -16.835,-2.615 -16.835,2.615 -16.02,2.615 ; 16.02,-2.615 16.835,-2.615 16.835,2.615 16.02,2.615
  text "1" at -17.62,2.1 h1.02
  text "2" at -17.97,-3.15 h1.02
  text "25" at 17.27,2.1 h1.02
  text "26" at 17.27,-3.15 h1.02
Mechanical 13:
  lines w0.1: -15.56,-2.54 -15.56,-3.35 -14.92,-3.35 -14.92,-2.54 ; -15.56,2.54 -15.56,3.35 -14.92,3.35 -14.92,2.54 ; -13.02,-2.54 -13.02,-3.35 -12.38,-3.35 -12.38,-2.54 ; -13.02,2.54 -13.02,3.35 -12.38,3.35 -12.38,2.54 ; -10.48,-2.54 -10.48,-3.35 -9.84,-3.35 -9.84,-2.54 ; -10.48,2.54 -10.48,3.35 -9.84,3.35 -9.84,2.54 ; -7.94,-2.54 -7.94,-3.35 -7.3,-3.35 -7.3,-2.54 ; -7.94,2.54 -7.94,3.35 -7.3,3.35 -7.3,2.54 ; -5.4,-2.54 -5.4,-3.35 -4.76,-3.35 -4.76,-2.54 ; -5.4,2.54 -5.4,3.35 -4.76,3.35 -4.76,2.54 ; -2.86,-2.54 -2.86,-3.35 -2.22,-3.35 -2.22,-2.54 ; -2.86,2.54 -2.86,3.35 -2.22,3.35 -2.22,2.54 ; -0.32,-2.54 -0.32,-3.35 0.32,-3.35 0.32,-2.54 ; -0.32,2.54 -0.32,3.35 0.32,3.35 0.32,2.54 ; 2.22,-2.54 2.22,-3.35 2.86,-3.35 2.86,-2.54 ; 2.22,2.54 2.22,3.35 2.86,3.35 2.86,2.54 ; 4.76,-2.54 4.76,-3.35 5.4,-3.35 5.4,-2.54 ; 4.76,2.54 4.76,3.35 5.4,3.35 5.4,2.54 ; 7.3,-2.54 7.3,-3.35 7.94,-3.35 7.94,-2.54 ; 7.3,2.54 7.3,3.35 7.94,3.35 7.94,2.54 ; 9.84,-2.54 9.84,-3.35 10.48,-3.35 10.48,-2.54 ; 9.84,2.54 9.84,3.35 10.48,3.35 10.48,2.54 ; 12.38,-2.54 12.38,-3.35 13.02,-3.35 13.02,-2.54 ; 12.38,2.54 12.38,3.35 13.02,3.35 13.02,2.54 ; 14.92,-2.54 14.92,-3.35 15.56,-3.35 15.56,-2.54 ; 14.92,2.54 14.92,3.35 15.56,3.35 15.56,2.54 ; -16.76,-2.54 -16.76,2.54 16.76,2.54 16.76,-2.54 -16.76,-2.54
Mechanical 15:
  lines w0.05: -0.5,0 0.5,0 ; 0,-0.5 0,0.5 ; -17.035,-3.7 -17.035,3.7 17.035,3.7 17.035,-3.7 -17.035,-3.7
3D body "61002621821.stp": height 8.5, standoff 0, extent -16.51,-3.35 16.51,3.35

## 61002821821 [mm] "Socket Header, Pitch 2.54 mm, SMT, Vertical, dual row, 28p"
height 7.45
pads (28):
  rect 1x1.8 smd: 1(-16.51,2.6) 2(-16.51,-2.6) 3(-13.97,2.6) 4(-13.97,-2.6) 5(-11.43,2.6) 6(-11.43,-2.6) 7(-8.89,2.6) 8(-8.89,-2.6) 9(-6.35,2.6) 10(-6.35,-2.6) 11(-3.81,2.6) 12(-3.81,-2.6) 13(-1.27,2.6) 14(-1.27,-2.6) 15(1.27,2.6) 16(1.27,-2.6) 17(3.81,2.6) 18(3.81,-2.6) 19(6.35,2.6) 20(6.35,-2.6) 21(8.89,2.6) 22(8.89,-2.6) 23(11.43,2.6) 24(11.43,-2.6) 25(13.97,2.6) 26(13.97,-2.6) 27(16.51,2.6) 28(16.51,-2.6)
Top Overlay:
  lines w0.2: -17.29,-2.615 -18.105,-2.615 -18.105,2.615 -17.29,2.615 ; 17.29,-2.615 18.105,-2.615 18.105,2.615 17.29,2.615
  text "1" at -18.89,2.1 h1.02
  text "2" at -19.24,-3.15 h1.02
  text "27" at 18.54,2.1 h1.02
  text "28" at 18.54,-3.15 h1.02
Mechanical 13:
  lines w0.1: -16.83,-2.54 -16.83,-3.35 -16.19,-3.35 -16.19,-2.54 ; -16.83,2.54 -16.83,3.35 -16.19,3.35 -16.19,2.54 ; -14.29,-2.54 -14.29,-3.35 -13.65,-3.35 -13.65,-2.54 ; -14.29,2.54 -14.29,3.35 -13.65,3.35 -13.65,2.54 ; -11.75,-2.54 -11.75,-3.35 -11.11,-3.35 -11.11,-2.54 ; -11.75,2.54 -11.75,3.35 -11.11,3.35 -11.11,2.54 ; -9.21,-2.54 -9.21,-3.35 -8.57,-3.35 -8.57,-2.54 ; -9.21,2.54 -9.21,3.35 -8.57,3.35 -8.57,2.54 ; -6.67,-2.54 -6.67,-3.35 -6.03,-3.35 -6.03,-2.54 ; -6.67,2.54 -6.67,3.35 -6.03,3.35 -6.03,2.54 ; -4.13,-2.54 -4.13,-3.35 -3.49,-3.35 -3.49,-2.54 ; -4.13,2.54 -4.13,3.35 -3.49,3.35 -3.49,2.54 ; -1.59,-2.54 -1.59,-3.35 -0.95,-3.35 -0.95,-2.54 ; -1.59,2.54 -1.59,3.35 -0.95,3.35 -0.95,2.54 ; 0.95,-2.54 0.95,-3.35 1.59,-3.35 1.59,-2.54 ; 0.95,2.54 0.95,3.35 1.59,3.35 1.59,2.54 ; 3.49,-2.54 3.49,-3.35 4.13,-3.35 4.13,-2.54 ; 3.49,2.54 3.49,3.35 4.13,3.35 4.13,2.54 ; 6.03,-2.54 6.03,-3.35 6.67,-3.35 6.67,-2.54 ; 6.03,2.54 6.03,3.35 6.67,3.35 6.67,2.54 ; 8.57,-2.54 8.57,-3.35 9.21,-3.35 9.21,-2.54 ; 8.57,2.54 8.57,3.35 9.21,3.35 9.21,2.54 ; 11.11,-2.54 11.11,-3.35 11.75,-3.35 11.75,-2.54 ; 11.11,2.54 11.11,3.35 11.75,3.35 11.75,2.54 ; 13.65,-2.54 13.65,-3.35 14.29,-3.35 14.29,-2.54 ; 13.65,2.54 13.65,3.35 14.29,3.35 14.29,2.54 ; 16.19,-2.54 16.19,-3.35 16.83,-3.35 16.83,-2.54 ; 16.19,2.54 16.19,3.35 16.83,3.35 16.83,2.54 ; -18.03,-2.54 18.03,-2.54 18.03,2.54 -18.03,2.54 -18.03,-2.54
Mechanical 15:
  lines w0.05: -0.5,0 0.5,0 ; 0,-0.5 0,0.5 ; -18.305,-3.7 18.305,-3.7 18.305,3.7 -18.305,3.7 -18.305,-3.7
3D body "61002821821.stp": height 8.5, standoff 0, extent -17.78,-3.35 17.78,3.35